# Altium footprint library QFN50P350X350X100-21N.PcbLib: 1 footprints
Each footprint in its own frame and in the unit in brackets; x right, y up, seen from the top. Pads: shape width x height; smd on the part's side, far side on the other; paste and mask are expansions set on the pad; w line width, h text height; cw(c..) or ccw(c..) is an arc to the next point about the centre after c.
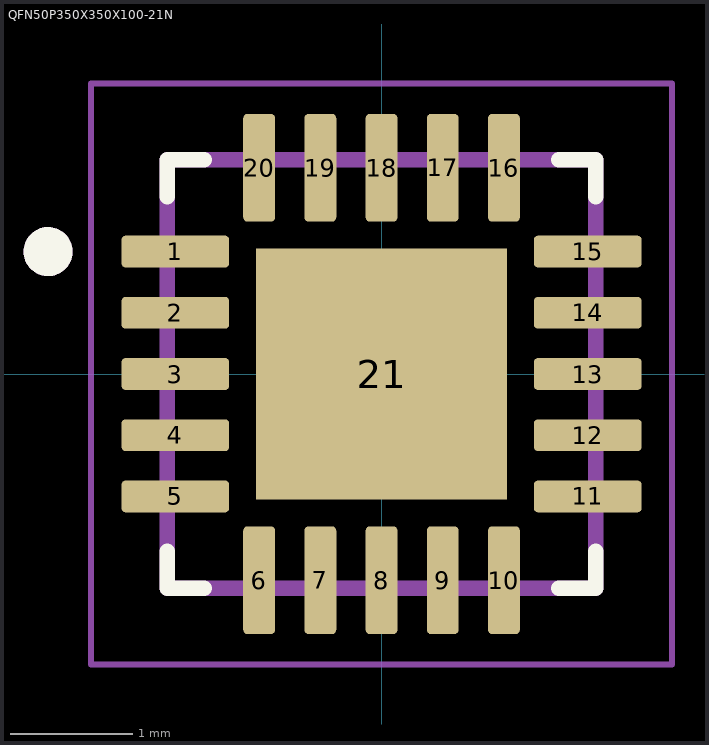
[diagram p0: the footprint, top view; thin cyan lines are the x and y axes]

## QFN50P350X350X100-21N [mm]
pads (21):
  rrect25% 0.88x0.26 smd: 1(-1.685,1) 2(-1.685,0.5) 3(-1.685,0) 4(-1.685,-0.5) 5(-1.685,-1) 11(1.685,-1) 12(1.685,-0.5) 13(1.685,0) 14(1.685,0.5) 15(1.685,1)
  rrect25% 0.26x0.88 smd: 6(-1,-1.685) 7(-0.5,-1.685) 8(0,-1.685) 9(0.5,-1.685) 10(1,-1.685) 16(1,1.685) 17(0.5,1.685) 18(0,1.685) 19(-0.5,1.685) 20(-1,1.685)
  rect 2.05x2.05 smd paste-2: 21(0,0)
Top Overlay:
  circle w0.2: c-2.725,1 r0.1
  lines w0.127: -1.75,-1.45 -1.75,-1.75 -1.45,-1.75 ; -1.75,1.45 -1.75,1.75 -1.45,1.75 ; 1.45,-1.75 1.75,-1.75 1.75,-1.45 ; 1.45,1.75 1.75,1.75 1.75,1.45
Top Paste:
  region: 0.65,-0.65 -0.65,-0.65 -0.65,0.65 0.65,0.65
Mechanical 13:
  circle w0.2: c-2.725,1 r0.1
  lines w0.127: -1.75,-1.75 1.75,-1.75 1.75,1.75 -1.75,1.75 -1.75,-1.75
Mechanical 15:
  lines w0.05: -2.375,-2.375 2.375,-2.375 2.375,2.375 -2.375,2.375 -2.375,-2.375